# Altium footprint library MY_LIB_Connectors_CONNFLY.PcbLib: 239 footprints (part 11 of 15)
Each footprint in its own frame and in the unit in brackets; x right, y up, seen from the top. Pads: shape width x height; smd on the part's side, far side on the other; paste and mask are expansions set on the pad; w line width, h text height; cw(c..) or ccw(c..) is an arc to the next point about the centre after c.
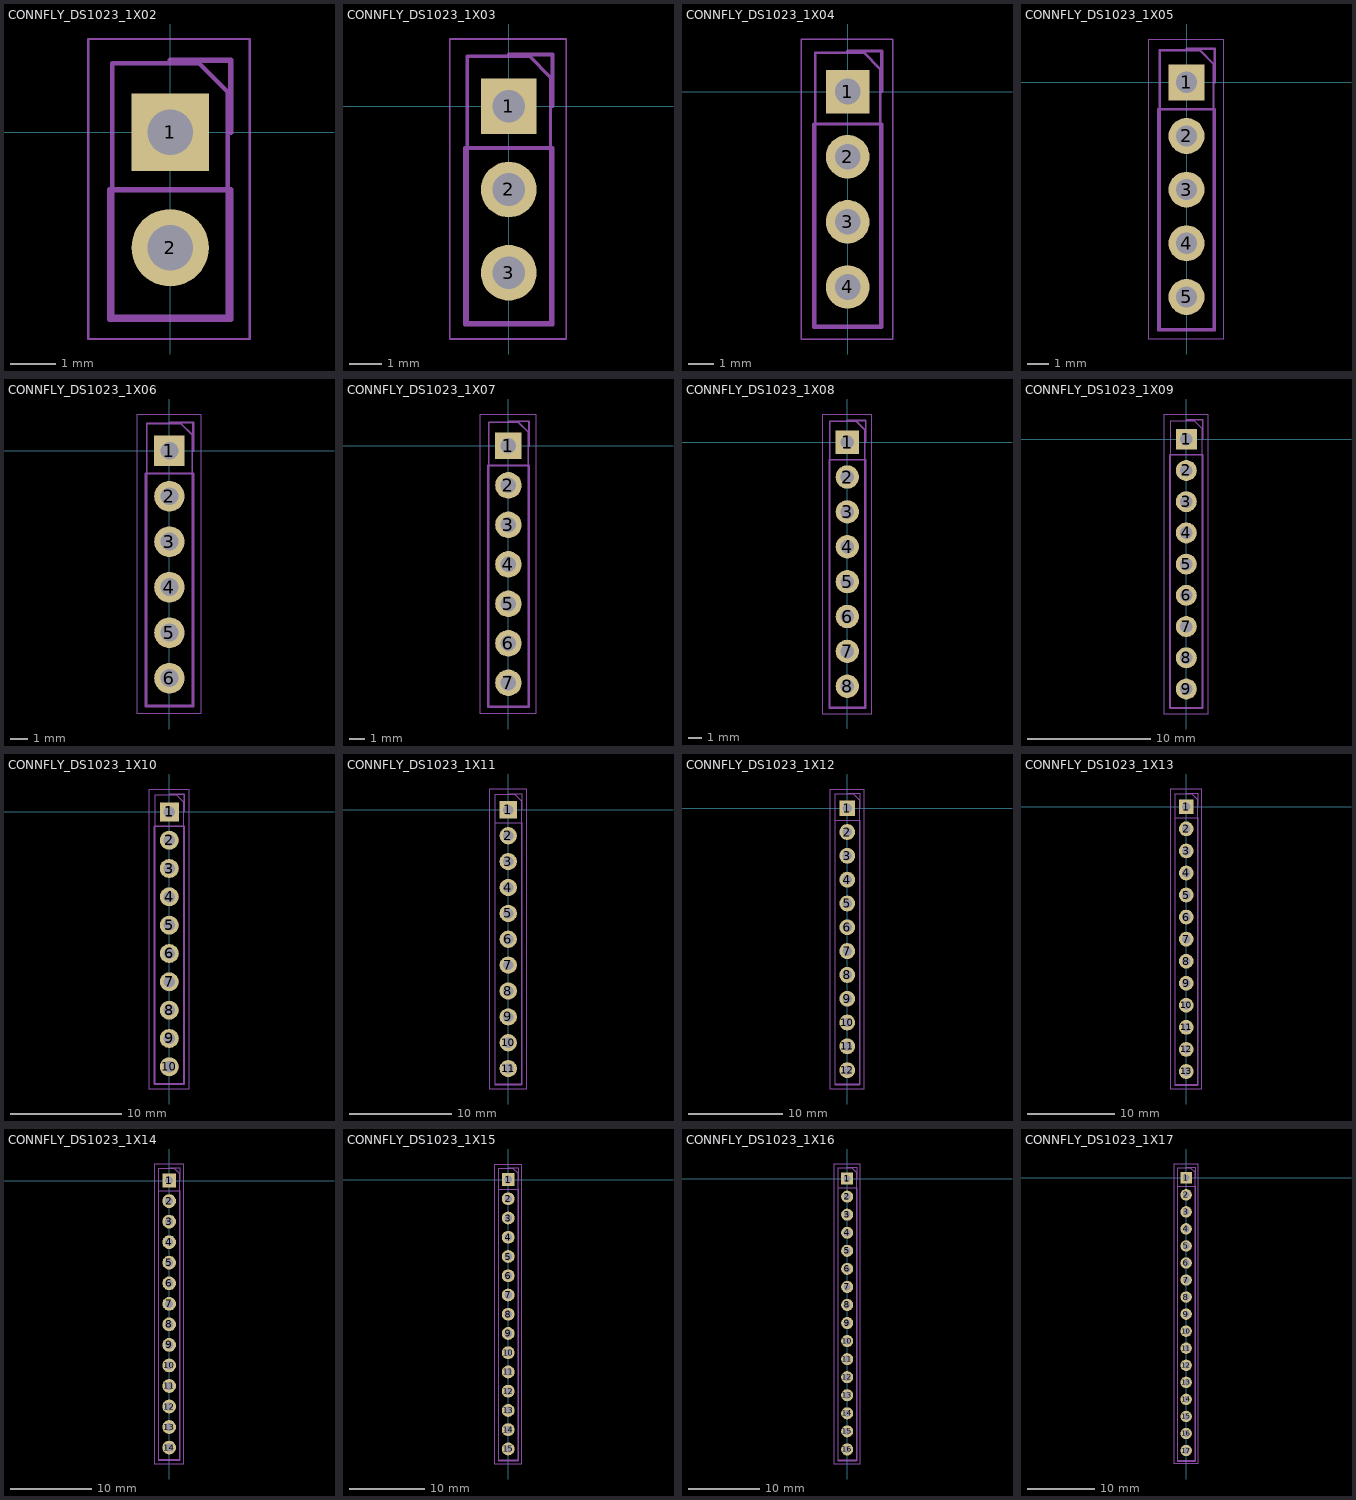
[diagram p10: the footprints below, top view; thin cyan lines are the x and y axes]

## CONNFLY_DS1023_1X02 [mm] "Connfly DS1023 1x2 standard KiCad; PTH1.0 pad1.7 pitch2.54; CC-BY-SA-4.0; STEP generic"
height 8.5
pads (2):
  rect 1.7x1.7 hole 1 paste-2539.97 mask+0.05: 1(0,0)
  round 1.7 hole 1 paste-2539.97 mask+0.05: 2(0,-2.54)
Mechanical 15:
  lines w0.05: -1.8,-4.55 -1.8,2.05 1.75,2.05 1.75,-4.55 -1.8,-4.55
  lines w0.1: -1.27,-4.06 -1.27,1.52 0.635,1.52 1.27,0.885 1.27,-4.06 -1.27,-4.06
  lines w0.12: 0,1.58 1.33,1.58 1.33,0 ; -1.33,-4.12 -1.33,-1.27 1.33,-1.27 1.33,-4.12 -1.33,-4.12
3D body "PinSocket_1x02_P2.54mm_Vertical.step": height 8.5, standoff -3.1, extent -1.27,-4.06 1.27,1.52

## CONNFLY_DS1023_1X03 [mm] "Connfly DS1023 1x3 standard KiCad; PTH1.0 pad1.7 pitch2.54; CC-BY-SA-4.0; STEP generic"
height 8.5
pads (3):
  rect 1.7x1.7 hole 1 paste-2539.97 mask+0.05: 1(0,0)
  round 1.7 hole 1 paste-2539.97 mask+0.05: 2(0,-2.54) 3(0,-5.08)
Mechanical 15:
  lines w0.05: -1.8,-7.1 -1.8,2.05 1.75,2.05 1.75,-7.1 -1.8,-7.1
  lines w0.1: -1.27,-6.6 -1.27,1.52 0.635,1.52 1.27,0.885 1.27,-6.6 -1.27,-6.6
  lines w0.12: 0,1.58 1.33,1.58 1.33,0 ; -1.33,-6.66 -1.33,-1.27 1.33,-1.27 1.33,-6.66 -1.33,-6.66
3D body "PinSocket_1x03_P2.54mm_Vertical.step": height 8.5, standoff -3.1, extent -1.27,-6.6 1.27,1.52

## CONNFLY_DS1023_1X04 [mm] "Connfly DS1023 1x4 standard KiCad; PTH1.0 pad1.7 pitch2.54; CC-BY-SA-4.0; STEP generic"
height 8.5
pads (4):
  rect 1.7x1.7 hole 1 paste-2539.97 mask+0.05: 1(0,0)
  round 1.7 hole 1 paste-2539.97 mask+0.05: 2(0,-2.54) 3(0,-5.08) 4(0,-7.62)
Mechanical 15:
  lines w0.05: -1.8,-9.65 -1.8,2.05 1.75,2.05 1.75,-9.65 -1.8,-9.65
  lines w0.1: -1.27,-9.14 -1.27,1.52 0.635,1.52 1.27,0.885 1.27,-9.14 -1.27,-9.14
  lines w0.12: 0,1.58 1.33,1.58 1.33,0 ; -1.33,-9.2 -1.33,-1.27 1.33,-1.27 1.33,-9.2 -1.33,-9.2
3D body "PinSocket_1x04_P2.54mm_Vertical.step": height 8.5, standoff -3.1, extent -1.27,-9.14 1.27,1.52

## CONNFLY_DS1023_1X05 [mm] "Connfly DS1023 1x5 standard KiCad; PTH1.0 pad1.7 pitch2.54; CC-BY-SA-4.0; STEP generic"
height 8.5
pads (5):
  rect 1.7x1.7 hole 1 paste-2539.97 mask+0.05: 1(0,0)
  round 1.7 hole 1 paste-2539.97 mask+0.05: 2(0,-2.54) 3(0,-5.08) 4(0,-7.62) 5(0,-10.16)
Mechanical 15:
  lines w0.05: -1.8,-12.15 -1.8,2.05 1.75,2.05 1.75,-12.15 -1.8,-12.15
  lines w0.1: -1.27,-11.68 -1.27,1.52 0.635,1.52 1.27,0.885 1.27,-11.68 -1.27,-11.68
  lines w0.12: 0,1.58 1.33,1.58 1.33,0 ; -1.33,-11.74 -1.33,-1.27 1.33,-1.27 1.33,-11.74 -1.33,-11.74
3D body "PinSocket_1x05_P2.54mm_Vertical.step": height 8.5, standoff -3.1, extent -1.27,-11.68 1.27,1.52

## CONNFLY_DS1023_1X06 [mm] "Connfly DS1023 1x6 standard KiCad; PTH1.0 pad1.7 pitch2.54; CC-BY-SA-4.0; STEP generic"
height 8.5
pads (6):
  rect 1.7x1.7 hole 1 paste-2539.97 mask+0.05: 1(0,0)
  round 1.7 hole 1 paste-2539.97 mask+0.05: 2(0,-2.54) 3(0,-5.08) 4(0,-7.62) 5(0,-10.16) 6(0,-12.7)
Mechanical 15:
  lines w0.05: -1.8,-14.7 -1.8,2.05 1.75,2.05 1.75,-14.7 -1.8,-14.7
  lines w0.1: -1.27,-14.22 -1.27,1.52 0.635,1.52 1.27,0.885 1.27,-14.22 -1.27,-14.22
  lines w0.12: 0,1.58 1.33,1.58 1.33,0 ; -1.33,-14.28 -1.33,-1.27 1.33,-1.27 1.33,-14.28 -1.33,-14.28
3D body "PinSocket_1x06_P2.54mm_Vertical.step": height 8.5, standoff -3.1, extent -1.27,-14.22 1.27,1.52

## CONNFLY_DS1023_1X07 [mm] "Connfly DS1023 1x7 standard KiCad; PTH1.0 pad1.7 pitch2.54; CC-BY-SA-4.0; STEP generic"
height 8.5
pads (7):
  rect 1.7x1.7 hole 1 paste-2539.97 mask+0.05: 1(0,0)
  round 1.7 hole 1 paste-2539.97 mask+0.05: 2(0,-2.54) 3(0,-5.08) 4(0,-7.62) 5(0,-10.16) 6(0,-12.7) 7(0,-15.24)
Mechanical 15:
  lines w0.05: -1.8,-17.25 -1.8,2.05 1.75,2.05 1.75,-17.25 -1.8,-17.25
  lines w0.1: -1.27,-16.76 -1.27,1.52 0.635,1.52 1.27,0.885 1.27,-16.76 -1.27,-16.76
  lines w0.12: 0,1.58 1.33,1.58 1.33,0 ; -1.33,-16.82 -1.33,-1.27 1.33,-1.27 1.33,-16.82 -1.33,-16.82
3D body "PinSocket_1x07_P2.54mm_Vertical.step": height 8.5, standoff -3.1, extent -1.27,-16.76 1.27,1.52

## CONNFLY_DS1023_1X08 [mm] "Connfly DS1023 1x8 standard KiCad; PTH1.0 pad1.7 pitch2.54; CC-BY-SA-4.0; STEP generic"
height 8.5
pads (8):
  rect 1.7x1.7 hole 1 paste-2539.97 mask+0.05: 1(0,0)
  round 1.7 hole 1 paste-2539.97 mask+0.05: 2(0,-2.54) 3(0,-5.08) 4(0,-7.62) 5(0,-10.16) 6(0,-12.7) 7(0,-15.24) 8(0,-17.78)
Mechanical 15:
  lines w0.05: -1.8,-19.8 -1.8,2.05 1.75,2.05 1.75,-19.8 -1.8,-19.8
  lines w0.1: -1.27,-19.3 -1.27,1.52 0.635,1.52 1.27,0.885 1.27,-19.3 -1.27,-19.3
  lines w0.12: 0,1.58 1.33,1.58 1.33,0 ; -1.33,-19.36 -1.33,-1.27 1.33,-1.27 1.33,-19.36 -1.33,-19.36
3D body "PinSocket_1x08_P2.54mm_Vertical.step": height 8.5, standoff -3.1, extent -1.27,-19.3 1.27,1.52

## CONNFLY_DS1023_1X09 [mm] "Connfly DS1023 1x9 standard KiCad; PTH1.0 pad1.7 pitch2.54; CC-BY-SA-4.0; STEP generic"
height 8.5
pads (9):
  rect 1.7x1.7 hole 1 paste-2539.97 mask+0.05: 1(0,0)
  round 1.7 hole 1 paste-2539.97 mask+0.05: 2(0,-2.54) 3(0,-5.08) 4(0,-7.62) 5(0,-10.16) 6(0,-12.7) 7(0,-15.24) 8(0,-17.78) 9(0,-20.32)
Mechanical 15:
  lines w0.05: -1.8,-22.35 -1.8,2.05 1.75,2.05 1.75,-22.35 -1.8,-22.35
  lines w0.1: -1.27,-21.84 -1.27,1.52 0.635,1.52 1.27,0.885 1.27,-21.84 -1.27,-21.84
  lines w0.12: 0,1.58 1.33,1.58 1.33,0 ; -1.33,-21.9 -1.33,-1.27 1.33,-1.27 1.33,-21.9 -1.33,-21.9
3D body "PinSocket_1x09_P2.54mm_Vertical.step": height 8.5, standoff -3.1, extent -1.27,-21.84 1.27,1.52

## CONNFLY_DS1023_1X10 [mm] "Connfly DS1023 1x10 standard KiCad; PTH1.0 pad1.7 pitch2.54; CC-BY-SA-4.0; STEP generic"
height 8.5
pads (10):
  rect 1.7x1.7 hole 1 paste-2539.97 mask+0.05: 1(0,0)
  round 1.7 hole 1 paste-2539.97 mask+0.05: 2(0,-2.54) 3(0,-5.08) 4(0,-7.62) 5(0,-10.16) 6(0,-12.7) 7(0,-15.24) 8(0,-17.78) 9(0,-20.32) 10(0,-22.86)
Mechanical 15:
  lines w0.05: -1.8,-24.85 -1.8,2.05 1.75,2.05 1.75,-24.85 -1.8,-24.85
  lines w0.1: -1.27,-24.38 -1.27,1.52 0.635,1.52 1.27,0.885 1.27,-24.38 -1.27,-24.38
  lines w0.12: 0,1.58 1.33,1.58 1.33,0 ; -1.33,-24.44 -1.33,-1.27 1.33,-1.27 1.33,-24.44 -1.33,-24.44
3D body "PinSocket_1x10_P2.54mm_Vertical.step": height 8.5, standoff -3.1, extent -1.27,-24.38 1.27,1.52

## CONNFLY_DS1023_1X11 [mm] "Connfly DS1023 1x11 standard KiCad; PTH1.0 pad1.7 pitch2.54; CC-BY-SA-4.0; STEP generic"
height 8.5
pads (11):
  rect 1.7x1.7 hole 1 paste-2539.97 mask+0.05: 1(0,0)
  round 1.7 hole 1 paste-2539.97 mask+0.05: 2(0,-2.54) 3(0,-5.08) 4(0,-7.62) 5(0,-10.16) 6(0,-12.7) 7(0,-15.24) 8(0,-17.78) 9(0,-20.32) 10(0,-22.86) 11(0,-25.4)
Mechanical 15:
  lines w0.05: -1.8,-27.4 -1.8,2.05 1.75,2.05 1.75,-27.4 -1.8,-27.4
  lines w0.1: -1.27,-26.92 -1.27,1.52 0.635,1.52 1.27,0.885 1.27,-26.92 -1.27,-26.92
  lines w0.12: 0,1.58 1.33,1.58 1.33,0 ; -1.33,-26.98 -1.33,-1.27 1.33,-1.27 1.33,-26.98 -1.33,-26.98
3D body "PinSocket_1x11_P2.54mm_Vertical.step": height 8.5, standoff -3.1, extent -1.27,-26.92 1.27,1.52

## CONNFLY_DS1023_1X12 [mm] "Connfly DS1023 1x12 standard KiCad; PTH1.0 pad1.7 pitch2.54; CC-BY-SA-4.0; STEP generic"
height 8.5
pads (12):
  rect 1.7x1.7 hole 1 paste-2539.97 mask+0.05: 1(0,0)
  round 1.7 hole 1 paste-2539.97 mask+0.05: 2(0,-2.54) 3(0,-5.08) 4(0,-7.62) 5(0,-10.16) 6(0,-12.7) 7(0,-15.24) 8(0,-17.78) 9(0,-20.32) 10(0,-22.86) 11(0,-25.4) 12(0,-27.94)
Mechanical 15:
  lines w0.05: -1.8,-29.95 -1.8,2.05 1.75,2.05 1.75,-29.95 -1.8,-29.95
  lines w0.1: -1.27,-29.46 -1.27,1.52 0.635,1.52 1.27,0.885 1.27,-29.46 -1.27,-29.46
  lines w0.12: 0,1.58 1.33,1.58 1.33,0 ; -1.33,-29.52 -1.33,-1.27 1.33,-1.27 1.33,-29.52 -1.33,-29.52
3D body "PinSocket_1x12_P2.54mm_Vertical.step": height 8.5, standoff -3.1, extent -1.27,-29.46 1.27,1.52

## CONNFLY_DS1023_1X13 [mm] "Connfly DS1023 1x13 standard KiCad; PTH1.0 pad1.7 pitch2.54; CC-BY-SA-4.0; STEP generic"
height 8.5
pads (13):
  rect 1.7x1.7 hole 1 paste-2539.97 mask+0.05: 1(0,0)
  round 1.7 hole 1 paste-2539.97 mask+0.05: 2(0,-2.54) 3(0,-5.08) 4(0,-7.62) 5(0,-10.16) 6(0,-12.7) 7(0,-15.24) 8(0,-17.78) 9(0,-20.32) 10(0,-22.86) 11(0,-25.4) 12(0,-27.94) 13(0,-30.48)
Mechanical 15:
  lines w0.05: -1.8,-32.5 -1.8,2.05 1.75,2.05 1.75,-32.5 -1.8,-32.5
  lines w0.1: -1.27,-32 -1.27,1.52 0.635,1.52 1.27,0.885 1.27,-32 -1.27,-32
  lines w0.12: 0,1.58 1.33,1.58 1.33,0 ; -1.33,-32.06 -1.33,-1.27 1.33,-1.27 1.33,-32.06 -1.33,-32.06
3D body "PinSocket_1x13_P2.54mm_Vertical.step": height 8.5, standoff -3.1, extent -1.27,-32 1.27,1.52

## CONNFLY_DS1023_1X14 [mm] "Connfly DS1023 1x14 standard KiCad; PTH1.0 pad1.7 pitch2.54; CC-BY-SA-4.0; STEP generic"
height 8.5
pads (14):
  rect 1.7x1.7 hole 1 paste-2539.97 mask+0.05: 1(0,0)
  round 1.7 hole 1 paste-2539.97 mask+0.05: 2(0,-2.54) 3(0,-5.08) 4(0,-7.62) 5(0,-10.16) 6(0,-12.7) 7(0,-15.24) 8(0,-17.78) 9(0,-20.32) 10(0,-22.86) 11(0,-25.4) 12(0,-27.94) 13(0,-30.48) 14(0,-33.02)
Mechanical 15:
  lines w0.05: -1.8,-35.05 -1.8,2.05 1.75,2.05 1.75,-35.05 -1.8,-35.05
  lines w0.1: -1.27,-34.54 -1.27,1.52 0.635,1.52 1.27,0.885 1.27,-34.54 -1.27,-34.54
  lines w0.12: 0,1.58 1.33,1.58 1.33,0 ; -1.33,-34.6 -1.33,-1.27 1.33,-1.27 1.33,-34.6 -1.33,-34.6
3D body "PinSocket_1x14_P2.54mm_Vertical.step": height 8.5, standoff -3.1, extent -1.27,-34.54 1.27,1.52

## CONNFLY_DS1023_1X15 [mm] "Connfly DS1023 1x15 standard KiCad; PTH1.0 pad1.7 pitch2.54; CC-BY-SA-4.0; STEP generic"
height 8.5
pads (15):
  rect 1.7x1.7 hole 1 paste-2539.97 mask+0.05: 1(0,0)
  round 1.7 hole 1 paste-2539.97 mask+0.05: 2(0,-2.54) 3(0,-5.08) 4(0,-7.62) 5(0,-10.16) 6(0,-12.7) 7(0,-15.24) 8(0,-17.78) 9(0,-20.32) 10(0,-22.86) 11(0,-25.4) 12(0,-27.94) 13(0,-30.48) 14(0,-33.02) 15(0,-35.56)
Mechanical 15:
  lines w0.05: -1.8,-37.55 -1.8,2.05 1.75,2.05 1.75,-37.55 -1.8,-37.55
  lines w0.1: -1.27,-37.08 -1.27,1.52 0.635,1.52 1.27,0.885 1.27,-37.08 -1.27,-37.08
  lines w0.12: 0,1.58 1.33,1.58 1.33,0 ; -1.33,-37.14 -1.33,-1.27 1.33,-1.27 1.33,-37.14 -1.33,-37.14
3D body "PinSocket_1x15_P2.54mm_Vertical.step": height 8.5, standoff -3.1, extent -1.27,-37.08 1.27,1.52

## CONNFLY_DS1023_1X16 [mm] "Connfly DS1023 1x16 standard KiCad; PTH1.0 pad1.7 pitch2.54; CC-BY-SA-4.0; STEP generic"
height 8.5
pads (16):
  rect 1.7x1.7 hole 1 paste-2539.97 mask+0.05: 1(0,0)
  round 1.7 hole 1 paste-2539.97 mask+0.05: 2(0,-2.54) 3(0,-5.08) 4(0,-7.62) 5(0,-10.16) 6(0,-12.7) 7(0,-15.24) 8(0,-17.78) 9(0,-20.32) 10(0,-22.86) 11(0,-25.4) 12(0,-27.94) 13(0,-30.48) 14(0,-33.02) 15(0,-35.56) 16(0,-38.1)
Mechanical 15:
  lines w0.05: -1.8,-40.15 -1.8,2.05 1.75,2.05 1.75,-40.15 -1.8,-40.15
  lines w0.1: -1.27,-39.62 -1.27,1.52 0.635,1.52 1.27,0.885 1.27,-39.62 -1.27,-39.62
  lines w0.12: 0,1.58 1.33,1.58 1.33,0 ; -1.33,-39.68 -1.33,-1.27 1.33,-1.27 1.33,-39.68 -1.33,-39.68
3D body "PinSocket_1x16_P2.54mm_Vertical.step": height 8.5, standoff -3.1, extent -1.27,-39.62 1.27,1.52

## CONNFLY_DS1023_1X17 [mm] "Connfly DS1023 1x17 standard KiCad; PTH1.0 pad1.7 pitch2.54; CC-BY-SA-4.0; STEP generic"
height 8.5
pads (17):
  rect 1.7x1.7 hole 1 paste-2539.97 mask+0.05: 1(0,0)
  round 1.7 hole 1 paste-2539.97 mask+0.05: 2(0,-2.54) 3(0,-5.08) 4(0,-7.62) 5(0,-10.16) 6(0,-12.7) 7(0,-15.24) 8(0,-17.78) 9(0,-20.32) 10(0,-22.86) 11(0,-25.4) 12(0,-27.94) 13(0,-30.48) 14(0,-33.02) 15(0,-35.56) 16(0,-38.1) 17(0,-40.64)
Mechanical 15:
  lines w0.05: -1.8,-42.65 -1.8,2.05 1.75,2.05 1.75,-42.65 -1.8,-42.65
  lines w0.1: -1.27,-42.16 -1.27,1.52 0.635,1.52 1.27,0.885 1.27,-42.16 -1.27,-42.16
  lines w0.12: 0,1.58 1.33,1.58 1.33,0 ; -1.33,-42.22 -1.33,-1.27 1.33,-1.27 1.33,-42.22 -1.33,-42.22
3D body "PinSocket_1x17_P2.54mm_Vertical.step": height 8.5, standoff -3.1, extent -1.27,-42.16 1.27,1.52